# Altium schematic symbol library fmuv5X.SchLib: 6 symbols
Pins are listed as number, name and electrical type; pins without a type are passive.

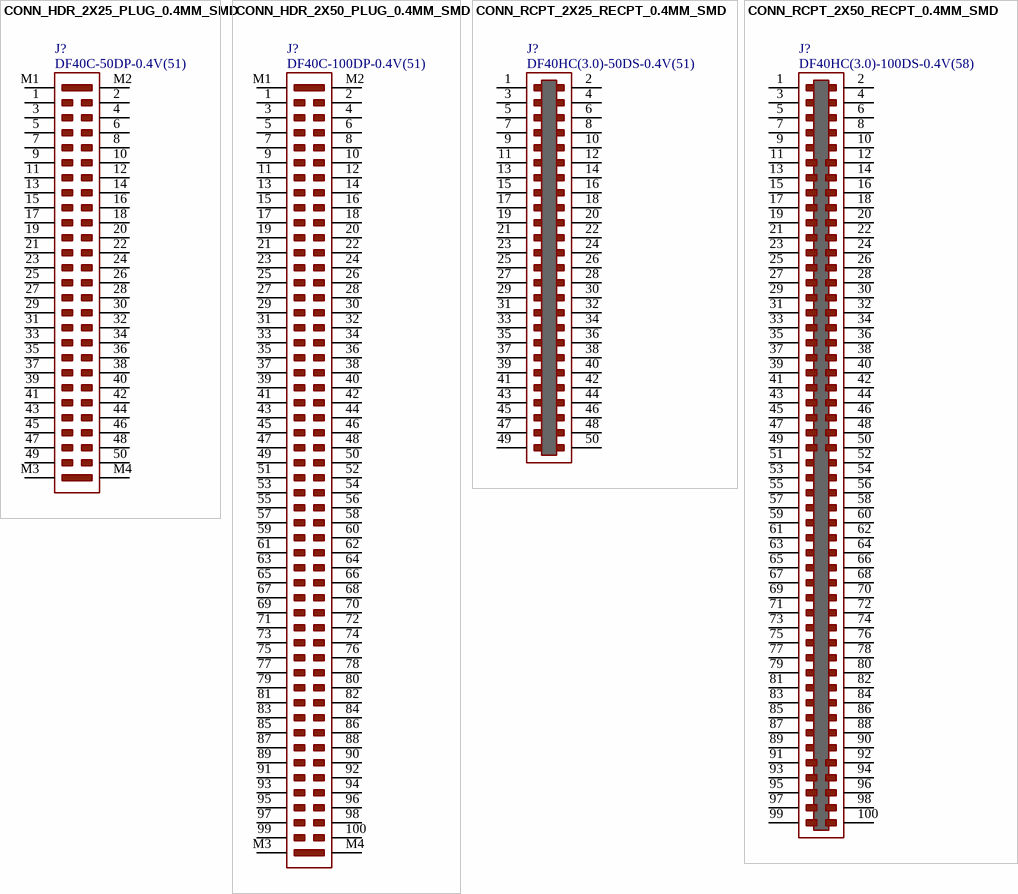
[diagram p0: symbols CONN_HDR_2X25_PLUG_0.4MM_SMD to CONN_RCPT_2X50_RECPT_0.4MM_SMD]

## CONN_HDR_2X25_PLUG_0.4MM_SMD
designator J?, comment Manufacturer Part Number: DF40C-50DP-0.4V(51)  (hidden comment: CONN HDR 50POS 0.4MM SMD GOLD)
Manufacturer: Hirose Electric Co Ltd; Number of Positions: 50; Pitch: 0.016" (0.40mm); System: Connector; Packaging: Cut Tape (CT); Part Status: Active; Number of Rows: 2; Mounting Type: Surface Mount; Operating Temperature: -65°C ~ 85°C; Supplier 1: Digi-Key; Supplier Part Number 1: H11626CT-ND; Category: Connectors, Interconnects; Stock 1: 57993; Pricing 1: 1=1.12, 10=0.982, 25=0.924, 50=0.8856, 100=0.847, 250=0.77, 500=0.693, 1000=0.616 (USD); ComponentLink1Description: https://www.digikey.com/products/en/connectors-interconnects/rectangular-connectors-arrays-edge-type-mezzanine-board-to-board/308?k=DF40C-50DP-0.4V51&k=&pkeyword=DF40C-50DP-0.4V51&pv7=2&sf=0&quantity=&ColumnSort=0&page=1&pageSize=25; ComponentLink1URL: https://www.digikey.com/products/en/connectors-interconnects/rectangular-connectors-arrays-edge-type-mezzanine-board-to-board/308?k=DF40C-50DP-0.4V51&k=&pkeyword=DF40C-50DP-0.4V51&pv7=2&sf=0&quantity=&ColumnSort=0&page=1&pageSize=25
footprint HIROSE_DF40C-50DP-0-4V51 (Connector, Vertical Board to Board Receptacle; 50 pin, 11.52 mm L X 1.85 mm W X 1.29 mm H body)
pins: 1, 2, 3, 4, 5, 6, 7, 8, 9, 10, 11, 12, 13, 14, 15, 16, 17, 18, 19, 20, 21, 22, 23, 24, 25, 26, 27, 28, 29, 30, 31, 32, 33, 34, 35, 36, 37, 38, 39, 40, 41, 42, 43, 44, 45, 46, 47, 48, 49, 50, M1, M2, M3, M4

## CONN_HDR_2X50_PLUG_0.4MM_SMD
designator J?, comment Manufacturer Part Number: DF40C-100DP-0.4V(51)  (hidden comment: CONN HDR 100POS 0.4MM SMD GOLD)
Manufacturer: Hirose Electric Co Ltd; Number of Positions: 100; Pitch: 0.016" (0.40mm); System: Connector; Packaging: Cut Tape (CT); Part Status: Active; Number of Rows: 2; Mounting Type: Surface Mount; Operating Temperature: -65°C ~ 85°C; Supplier 1: Digi-Key; Supplier Part Number 1: H11614CT-ND; Category: Connectors, Interconnects; Stock 1: 27593; Pricing 1: 1=1.96 (USD); ComponentLink1Description: https://www.digikey.com/product-detail/en/hirose-electric-co-ltd/DF40C-100DP-0.4V-51/H11614CT-ND/1969494; ComponentLink1URL: https://www.digikey.com/product-detail/en/hirose-electric-co-ltd/DF40C-100DP-0.4V-51/H11614CT-ND/1969494
footprint HIROSE_DF40C-100DP-0_4V51 (Connector, Vertical Board to Board Plug; 104 pin, 21.52 mm L X 1.85 mm W X 1.29 mm H body)
pins: 1, 2, 3, 4, 5, 6, 7, 8, 9, 10, 11, 12, 13, 14, 15, 16, 17, 18, 19, 20, 21, 22, 23, 24, 25, 26, 27, 28, 29, 30, 31, 32, 33, 34, 35, 36, 37, 38, 39, 40, 41, 42, 43, 44, 45, 46, 47, 48, 49, 50, 51, 52, 53, 54, 55, 56, 57, 58, 59, 60, 61, 62, 63, 64, 65, 66, 67, 68, 69, 70, 71, 72, 73, 74, 75, 76, 77, 78, 79, 80, 81, 82, 83, 84, 85, 86, 87, 88, 89, 90, 91, 92, 93, 94, 95, 96, 97, 98, 99, 100, M1, M2, M3, M4

## CONN_RCPT_2X25_RECPT_0.4MM_SMD
designator J?, comment Manufacturer Part Number: DF40HC(3.0)-50DS-0.4V(51)  (hidden comment: CONN RCPT 50POS 0.4MM SMD GOLD)
Manufacturer: Hirose Electric Co Ltd; Number of Positions: 50; Pitch: 0.016" (0.40mm); System: Connector; Mated Stacking Heights: 3mm; Packaging: Cut Tape (CT); Part Status: Active; Number of Rows: 2; Mounting Type: Surface Mount; Operating Temperature: -65°C ~ 85°C; Supplier 1: Digi-Key; Supplier Part Number 1: H11915CT-ND; Category: Connectors, Interconnects; Stock 1: 8712; Pricing 1: 1=1.05, 10=0.926, 25=0.8712, 50=0.835, 100=0.7986, 250=0.726, 500=0.6534, 1000=0.5808 (USD); ComponentLink1Description: https://www.digikey.com/products/en/connectors-interconnects/rectangular-connectors-arrays-edge-type-mezzanine-board-to-board/308?k=DF40HC%283.0%29-50DS-0.4V%2851%29&k=&pkeyword=DF40HC%283.0%29-50DS-0.4V%2851%29&sv=0&pv7=2&sf=0&quantity=&ColumnSort=0&page=1&pageSize=25; ComponentLink1URL: https://www.digikey.com/products/en/connectors-interconnects/rectangular-connectors-arrays-edge-type-mezzanine-board-to-board/308?k=DF40HC%283.0%29-50DS-0.4V%2851%29&k=&pkeyword=DF40HC%283.0%29-50DS-0.4V%2851%29&sv=0&pv7=2&sf=0&quantity=&ColumnSort=0&page=1&pageSize=25
footprint HIROSE_DF40C-50DS-0-4V51 (Connector, Vertical Board to Board Receptacle; 50 pin, 12.60 mm L X 2.94 mm W X 2.10 mm H body)
pins: 1, 2, 3, 4, 5, 6, 7, 8, 9, 10, 11, 12, 13, 14, 15, 16, 17, 18, 19, 20, 21, 22, 23, 24, 25, 26, 27, 28, 29, 30, 31, 32, 33, 34, 35, 36, 37, 38, 39, 40, 41, 42, 43, 44, 45, 46, 47, 48, 49, 50

## CONN_RCPT_2X50_RECPT_0.4MM_SMD
designator J?, comment Manufacturer Part Number: DF40HC(3.0)-100DS-0.4V(58)  (hidden comment: CONN RCPT 100POS 0.4MM SMD GOLD)
Manufacturer: Hirose Electric Co Ltd; Number of Positions: 100; Pitch: 0.016" (0.40mm); System: Connector; Mated Stacking Heights: 3mm; Packaging: Cut Tape (CT); Part Status: Active; Number of Rows: 2; Mounting Type: Surface Mount; Operating Temperature: -65°C ~ 85°C; Supplier 1: Digi-Key; Supplier Part Number 1: H124602CT-ND; Category: Connectors, Interconnects; Stock 1: 2220; Pricing 1: 1=2.75 (USD); ComponentLink1Description: https://www.digikey.com/products/en/connectors-interconnects/rectangular-connectors-arrays-edge-type-mezzanine-board-to-board/308?k=df40hc%283.0%29-100&k=&pkeyword=df40hc%283.0%29-100&sv=0&pv7=2&sf=0&quantity=&ColumnSort=0&page=1&pageSize=25; ComponentLink1URL: https://www.digikey.com/products/en/connectors-interconnects/rectangular-connectors-arrays-edge-type-mezzanine-board-to-board/308?k=df40hc%283.0%29-100&k=&pkeyword=df40hc%283.0%29-100&sv=0&pv7=2&sf=0&quantity=&ColumnSort=0&page=1&pageSize=25
footprint HIROSE_DF40HC3_0-100DS-0_4V51 (Connector, Vertical Board to Board Receptacle; 100 pin, 22.60 mm L X 2.94 mm W X 3.05 mm H body)
pins: 1, 2, 3, 4, 5, 6, 7, 8, 9, 10, 11, 12, 13, 14, 15, 16, 17, 18, 19, 20, 21, 22, 23, 24, 25, 26, 27, 28, 29, 30, 31, 32, 33, 34, 35, 36, 37, 38, 39, 40, 41, 42, 43, 44, 45, 46, 47, 48, 49, 50, 51, 52, 53, 54, 55, 56, 57, 58, 59, 60, 61, 62, 63, 64, 65, 66, 67, 68, 69, 70, 71, 72, 73, 74, 75, 76, 77, 78, 79, 80, 81, 82, 83, 84, 85, 86, 87, 88, 89, 90, 91, 92, 93, 94, 95, 96, 97, 98, 99, 100

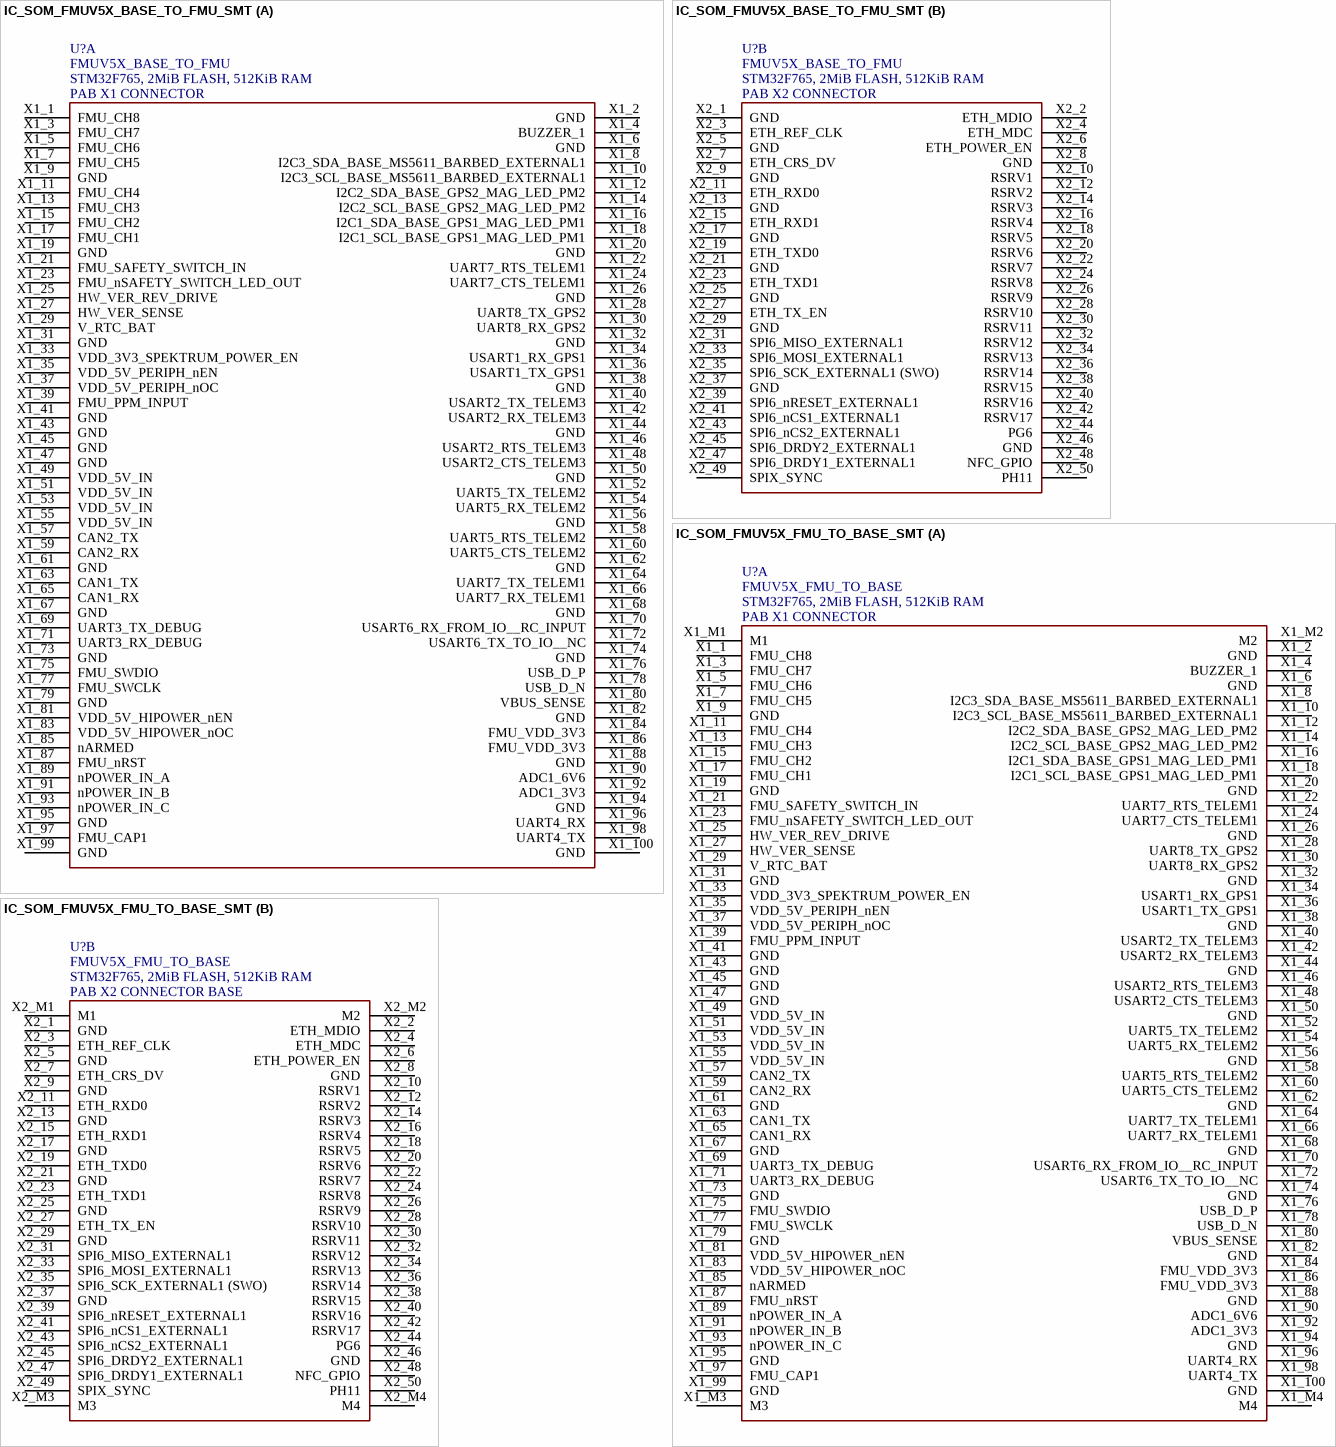
[diagram p1: symbols IC_SOM_FMUV5X_BASE_TO_FMU_SMT to IC_SOM_FMUV5X_FMU_TO_BASE_SMT]

## IC_SOM_FMUV5X_BASE_TO_FMU_SMT
designator U?, comment ID: STM32F765, 2MiB FLASH, 512KiB RAM  Manufacturer Part Number: FMUV5X_BASE_TO_FMU  (hidden comment: IC SOM FMUV5X BASE TO FMU SMT)
Manufacturer: Auterion; Packaging: Bulk; Part Status: Active; Operating Temperature: -40°C ~ 85°C (TA); Category: Integrated Circuits (ICs)
footprint SOM_FMUV5X_BASE_TO_FMU (Module, SOM, 41 mm L X 34 mm W X 10 mm H body)
part A pins: X1_1 FMU_CH8, X1_2 GND, X1_3 FMU_CH7, X1_4 BUZZER_1, X1_5 FMU_CH6, X1_6 GND, X1_7 FMU_CH5, X1_8 I2C3_SDA_BASE_MS5611_BARBED_EXTERNAL1, X1_9 GND, X1_10 I2C3_SCL_BASE_MS5611_BARBED_EXTERNAL1, X1_11 FMU_CH4, X1_12 I2C2_SDA_BASE_GPS2_MAG_LED_PM2, X1_13 FMU_CH3, X1_14 I2C2_SCL_BASE_GPS2_MAG_LED_PM2, X1_15 FMU_CH2, X1_16 I2C1_SDA_BASE_GPS1_MAG_LED_PM1, X1_17 FMU_CH1, X1_18 I2C1_SCL_BASE_GPS1_MAG_LED_PM1, X1_19 GND, X1_20 GND, X1_21 FMU_SAFETY_SWITCH_IN, X1_22 UART7_RTS_TELEM1, X1_23 FMU_nSAFETY_SWITCH_LED_OUT, X1_24 UART7_CTS_TELEM1, X1_25 HW_VER_REV_DRIVE, X1_26 GND, X1_27 HW_VER_SENSE, X1_28 UART8_TX_GPS2, X1_29 V_RTC_BAT, X1_30 UART8_RX_GPS2, X1_31 GND, X1_32 GND, X1_33 VDD_3V3_SPEKTRUM_POWER_EN, X1_34 USART1_RX_GPS1, X1_35 VDD_5V_PERIPH_nEN, X1_36 USART1_TX_GPS1, X1_37 VDD_5V_PERIPH_nOC, X1_38 GND, X1_39 FMU_PPM_INPUT, X1_40 USART2_TX_TELEM3, X1_41 GND, X1_42 USART2_RX_TELEM3, X1_43 GND, X1_44 GND, X1_45 GND, X1_46 USART2_RTS_TELEM3, X1_47 GND, X1_48 USART2_CTS_TELEM3, X1_49 VDD_5V_IN, X1_50 GND, X1_51 VDD_5V_IN, X1_52 UART5_TX_TELEM2, X1_53 VDD_5V_IN, X1_54 UART5_RX_TELEM2, X1_55 VDD_5V_IN, X1_56 GND, X1_57 CAN2_TX, X1_58 UART5_RTS_TELEM2, X1_59 CAN2_RX, X1_60 UART5_CTS_TELEM2, X1_61 GND, X1_62 GND, X1_63 CAN1_TX, X1_64 UART7_TX_TELEM1, X1_65 CAN1_RX, X1_66 UART7_RX_TELEM1, X1_67 GND, X1_68 GND, X1_69 UART3_TX_DEBUG, X1_70 USART6_RX_FROM_IO__RC_INPUT, X1_71 UART3_RX_DEBUG, X1_72 USART6_TX_TO_IO__NC, X1_73 GND, X1_74 GND, X1_75 FMU_SWDIO, X1_76 USB_D_P, X1_77 FMU_SWCLK, X1_78 USB_D_N, X1_79 GND, X1_80 VBUS_SENSE, X1_81 VDD_5V_HIPOWER_nEN, X1_82 GND, X1_83 VDD_5V_HIPOWER_nOC, X1_84 FMU_VDD_3V3, X1_85 nARMED, X1_86 FMU_VDD_3V3, X1_87 FMU_nRST, X1_88 GND, X1_89 nPOWER_IN_A, X1_90 ADC1_6V6, X1_91 nPOWER_IN_B, X1_92 ADC1_3V3, X1_93 nPOWER_IN_C, X1_94 GND, X1_95 GND, X1_96 UART4_RX, X1_97 FMU_CAP1, X1_98 UART4_TX, X1_99 GND, X1_100 GND
part B pins: X2_1 GND, X2_2 ETH_MDIO, X2_3 ETH_REF_CLK, X2_4 ETH_MDC, X2_5 GND, X2_6 ETH_POWER_EN, X2_7 ETH_CRS_DV, X2_8 GND, X2_9 GND, X2_10 RSRV1, X2_11 ETH_RXD0, X2_12 RSRV2, X2_13 GND, X2_14 RSRV3, X2_15 ETH_RXD1, X2_16 RSRV4, X2_17 GND, X2_18 RSRV5, X2_19 ETH_TXD0, X2_20 RSRV6, X2_21 GND, X2_22 RSRV7, X2_23 ETH_TXD1, X2_24 RSRV8, X2_25 GND, X2_26 RSRV9, X2_27 ETH_TX_EN, X2_28 RSRV10, X2_29 GND, X2_30 RSRV11, X2_31 SPI6_MISO_EXTERNAL1, X2_32 RSRV12, X2_33 SPI6_MOSI_EXTERNAL1, X2_34 RSRV13, X2_35 SPI6_SCK_EXTERNAL1 (SWO), X2_36 RSRV14, X2_37 GND, X2_38 RSRV15, X2_39 SPI6_nRESET_EXTERNAL1, X2_40 RSRV16, X2_41 SPI6_nCS1_EXTERNAL1, X2_42 RSRV17, X2_43 SPI6_nCS2_EXTERNAL1, X2_44 PG6, X2_45 SPI6_DRDY2_EXTERNAL1, X2_46 GND, X2_47 SPI6_DRDY1_EXTERNAL1, X2_48 NFC_GPIO, X2_49 SPIX_SYNC, X2_50 PH11
part A text: PAB X1 CONNECTOR
part B text: PAB X2 CONNECTOR

## IC_SOM_FMUV5X_FMU_TO_BASE_SMT
designator U?, comment ID: STM32F765, 2MiB FLASH, 512KiB RAM  Manufacturer Part Number: FMUV5X_FMU_TO_BASE  (hidden comment: IC SOM FMUV5X FMU TO BASE SMT)
Manufacturer: Auterion; Packaging: Bulk; Part Status: Active; Operating Temperature: -40°C ~ 85°C (TA); Category: Integrated Circuits (ICs)
footprint SOM_FMUV5X_FMU_TO_BASE (SOM Interface to Base, 41 mm L X 34 mm W X 10 mm H body)
part A pins: X1_1 FMU_CH8, X1_2 GND, X1_3 FMU_CH7, X1_4 BUZZER_1, X1_5 FMU_CH6, X1_6 GND, X1_7 FMU_CH5, X1_8 I2C3_SDA_BASE_MS5611_BARBED_EXTERNAL1, X1_9 GND, X1_10 I2C3_SCL_BASE_MS5611_BARBED_EXTERNAL1, X1_11 FMU_CH4, X1_12 I2C2_SDA_BASE_GPS2_MAG_LED_PM2, X1_13 FMU_CH3, X1_14 I2C2_SCL_BASE_GPS2_MAG_LED_PM2, X1_15 FMU_CH2, X1_16 I2C1_SDA_BASE_GPS1_MAG_LED_PM1, X1_17 FMU_CH1, X1_18 I2C1_SCL_BASE_GPS1_MAG_LED_PM1, X1_19 GND, X1_20 GND, X1_21 FMU_SAFETY_SWITCH_IN, X1_22 UART7_RTS_TELEM1, X1_23 FMU_nSAFETY_SWITCH_LED_OUT, X1_24 UART7_CTS_TELEM1, X1_25 HW_VER_REV_DRIVE, X1_26 GND, X1_27 HW_VER_SENSE, X1_28 UART8_TX_GPS2, X1_29 V_RTC_BAT, X1_30 UART8_RX_GPS2, X1_31 GND, X1_32 GND, X1_33 VDD_3V3_SPEKTRUM_POWER_EN, X1_34 USART1_RX_GPS1, X1_35 VDD_5V_PERIPH_nEN, X1_36 USART1_TX_GPS1, X1_37 VDD_5V_PERIPH_nOC, X1_38 GND, X1_39 FMU_PPM_INPUT, X1_40 USART2_TX_TELEM3, X1_41 GND, X1_42 USART2_RX_TELEM3, X1_43 GND, X1_44 GND, X1_45 GND, X1_46 USART2_RTS_TELEM3, X1_47 GND, X1_48 USART2_CTS_TELEM3, X1_49 VDD_5V_IN, X1_50 GND, X1_51 VDD_5V_IN, X1_52 UART5_TX_TELEM2, X1_53 VDD_5V_IN, X1_54 UART5_RX_TELEM2, X1_55 VDD_5V_IN, X1_56 GND, X1_57 CAN2_TX, X1_58 UART5_RTS_TELEM2, X1_59 CAN2_RX, X1_60 UART5_CTS_TELEM2, X1_61 GND, X1_62 GND, X1_63 CAN1_TX, X1_64 UART7_TX_TELEM1, X1_65 CAN1_RX, X1_66 UART7_RX_TELEM1, X1_67 GND, X1_68 GND, X1_69 UART3_TX_DEBUG, X1_70 USART6_RX_FROM_IO__RC_INPUT, X1_71 UART3_RX_DEBUG, X1_72 USART6_TX_TO_IO__NC, X1_73 GND, X1_74 GND, X1_75 FMU_SWDIO, X1_76 USB_D_P, X1_77 FMU_SWCLK, X1_78 USB_D_N, X1_79 GND, X1_80 VBUS_SENSE, X1_81 VDD_5V_HIPOWER_nEN, X1_82 GND, X1_83 VDD_5V_HIPOWER_nOC, X1_84 FMU_VDD_3V3, X1_85 nARMED, X1_86 FMU_VDD_3V3, X1_87 FMU_nRST, X1_88 GND, X1_89 nPOWER_IN_A, X1_90 ADC1_6V6, X1_91 nPOWER_IN_B, X1_92 ADC1_3V3, X1_93 nPOWER_IN_C, X1_94 GND, X1_95 GND, X1_96 UART4_RX, X1_97 FMU_CAP1, X1_98 UART4_TX, X1_99 GND, X1_100 GND, X1_M1 M1, X1_M2 M2, X1_M3 M3, X1_M4 M4
part B pins: X2_1 GND, X2_2 ETH_MDIO, X2_3 ETH_REF_CLK, X2_4 ETH_MDC, X2_5 GND, X2_6 ETH_POWER_EN, X2_7 ETH_CRS_DV, X2_8 GND, X2_9 GND, X2_10 RSRV1, X2_11 ETH_RXD0, X2_12 RSRV2, X2_13 GND, X2_14 RSRV3, X2_15 ETH_RXD1, X2_16 RSRV4, X2_17 GND, X2_18 RSRV5, X2_19 ETH_TXD0, X2_20 RSRV6, X2_21 GND, X2_22 RSRV7, X2_23 ETH_TXD1, X2_24 RSRV8, X2_25 GND, X2_26 RSRV9, X2_27 ETH_TX_EN, X2_28 RSRV10, X2_29 GND, X2_30 RSRV11, X2_31 SPI6_MISO_EXTERNAL1, X2_32 RSRV12, X2_33 SPI6_MOSI_EXTERNAL1, X2_34 RSRV13, X2_35 SPI6_SCK_EXTERNAL1 (SWO), X2_36 RSRV14, X2_37 GND, X2_38 RSRV15, X2_39 SPI6_nRESET_EXTERNAL1, X2_40 RSRV16, X2_41 SPI6_nCS1_EXTERNAL1, X2_42 RSRV17, X2_43 SPI6_nCS2_EXTERNAL1, X2_44 PG6, X2_45 SPI6_DRDY2_EXTERNAL1, X2_46 GND, X2_47 SPI6_DRDY1_EXTERNAL1, X2_48 NFC_GPIO, X2_49 SPIX_SYNC, X2_50 PH11, X2_M1 M1, X2_M2 M2, X2_M3 M3, X2_M4 M4
part A text: PAB X1 CONNECTOR
part B text: PAB X2 CONNECTOR BASE